# Altium schematic symbol library Schlib1.SchLib: 5 symbols
Pins are listed as number, name and electrical type; pins without a type are passive.

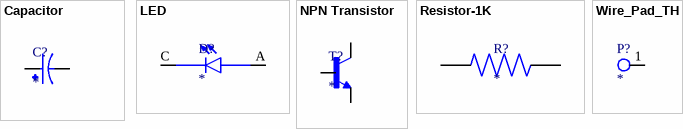
[diagram p0: symbols Capacitor to Wire_Pad_TH]

## Capacitor
designator C?
CAP ALUM 10UF 20% 450V RADIAL; MP: ECA-2WM100B; MF: Panasonic; Availability: In Stock; Check_prices: https://www.snapeda.com/parts/ECA-2WM100B/Panasonic/view-part/2313535/?ref=eda; SnapEDA_Link: https://www.snapeda.com/parts/ECA-2WM100B/Panasonic/view-part/2313535/?ref=snap; Value: *; Price: None; Purchase-URL: https://pricing.snapeda.com/search/part/ECA-2WM100B/?ref=eda; Package: RADIAL-2 Panasonic
footprint CAPACITOR
pins: N, P

## LED
designator D?
Red 617nm LED Indication - Discrete 2V Radial; MP: WP7113ID; MF: Kingbright; Price: None; Package: Radial Kingbright; Check_prices: https://www.snapeda.com/parts/WP7113ID/Kingbright/view-part/?ref=eda; Purchase-URL: https://pricing.snapeda.com/search/part/WP7113ID/?ref=eda; Availability: In Stock; Value: *; SnapEDA_Link: https://www.snapeda.com/parts/WP7113ID/Kingbright/view-part/?ref=snap
footprint LED (LED_WP7113ID)
pins: A, C

## NPN Transistor
designator T?
BJT, TO-92, 40V, 600mA, NPN, 0.625W, 150Â°C; MF: Diotec Semiconductor; MP: 2N2222A; SnapEDA_Link: https://www.snapeda.com/parts/2N2222A/Diotec/view-part/?ref=snap; Package: TO-92 Diotec; Value: *; Check_prices: https://www.snapeda.com/parts/2N2222A/Diotec/view-part/?ref=eda
footprint TRANSISTOR
pins: 1 E, 2 B, 3 C

## Resistor-1K
designator R?
1.07 kOhms Â±1% 0.25W, 1/4W Through Hole Resistor Axial - Metal Film; MF: Yageo; MP: MFR-25FBF52-1K; SnapEDA_Link: https://www.snapeda.com/parts/MFR-25FBF52-1K/Yageo/view-part/?ref=snap; Package: RADIAL-2 YAGEO; Value: *; Check_prices: https://www.snapeda.com/parts/MFR-25FBF52-1K/Yageo/view-part/?ref=eda
footprint Resistor
pins: 1, 2

## Wire_Pad_TH
designator P?
footprint Wire_Pad_TH
pins: 1